# Altium schematic symbol library fuses.SchLib: 1 symbol
Pins are listed as number, name and electrical type; pins without a type are passive.

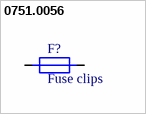
[diagram p0: symbol 0751.0056]

## 0751.0056
designator F?, comment Fuse clips
Fuse clips; cylindrical fuses; THT; 5x20mm,6.3x32mm; 16A; bronze
footprint 0751.0056 (Fuse clips; cylindrical fuses; THT; 5x20mm,6.3x32mm; 16A; bronze); pin to pad 1>1+2 2>3+4
pins: 1, 2